# Altium footprint library TL084CN.PcbLib: 1 footprints
Each footprint in its own frame and in the unit in brackets; x right, y up, seen from the top. Pads: shape width x height; smd on the part's side, far side on the other; paste and mask are expansions set on the pad; w line width, h text height; cw(c..) or ccw(c..) is an arc to the next point about the centre after c.
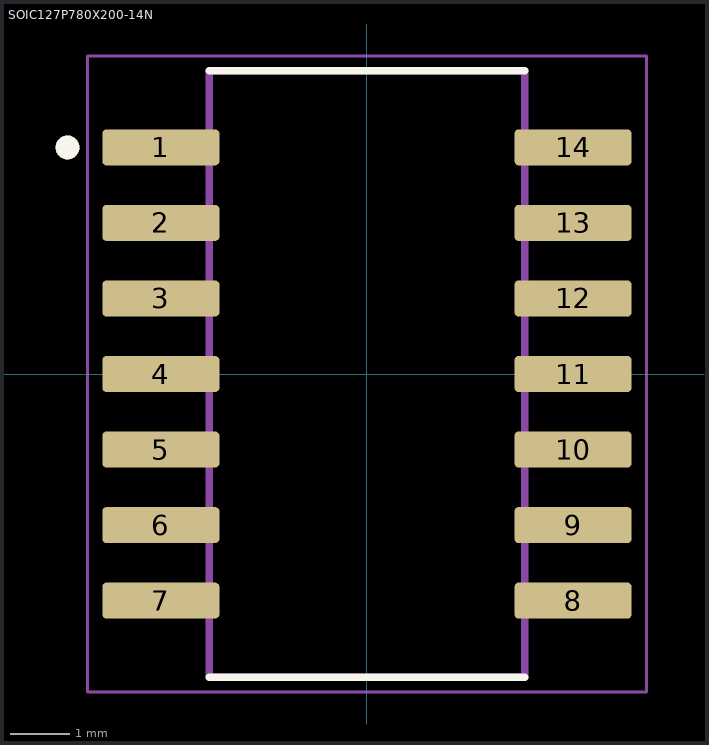
[diagram p0: the footprint, top view; thin cyan lines are the x and y axes]

## SOIC127P780X200-14N [mm]
pads (14):
  rrect25% 1.97x0.61 smd paste+0 mask+0.102: 1(-3.465,3.81) 2(-3.465,2.54) 3(-3.465,1.27) 4(-3.465,0) 5(-3.465,-1.27) 6(-3.465,-2.54) 7(-3.465,-3.81) 8(3.465,-3.81) 9(3.465,-2.54) 10(3.465,-1.27) 11(3.465,0) 12(3.465,1.27) 13(3.465,2.54) 14(3.465,3.81)
Top Overlay:
  circle w0.2: c-5.035,3.81 r0.1
  lines w0.127: -2.65,-5.1 2.65,-5.1 ; -2.65,5.1 2.65,5.1
Assembly Top:
  circle w0.2: c-5.035,3.81 r0.1
  lines w0.127: -2.65,-5.1 2.65,-5.1 2.65,5.1 -2.65,5.1 -2.65,-5.1
Courtyard Top:
  lines w0.05: -4.7,-5.35 4.7,-5.35 4.7,5.35 -4.7,5.35 -4.7,-5.35
3D body "TL084CNSR.STEP": height 2, standoff 0, extent -3.9,-5.1 3.9,5.1